# Altium footprint library LM399AHPBF.PcbLib: 1 footprints
Each footprint in its own frame and in the unit in brackets; x right, y up, seen from the top. Pads: shape width x height; smd on the part's side, far side on the other; paste and mask are expansions set on the pad; w line width, h text height; cw(c..) or ccw(c..) is an arc to the next point about the centre after c.
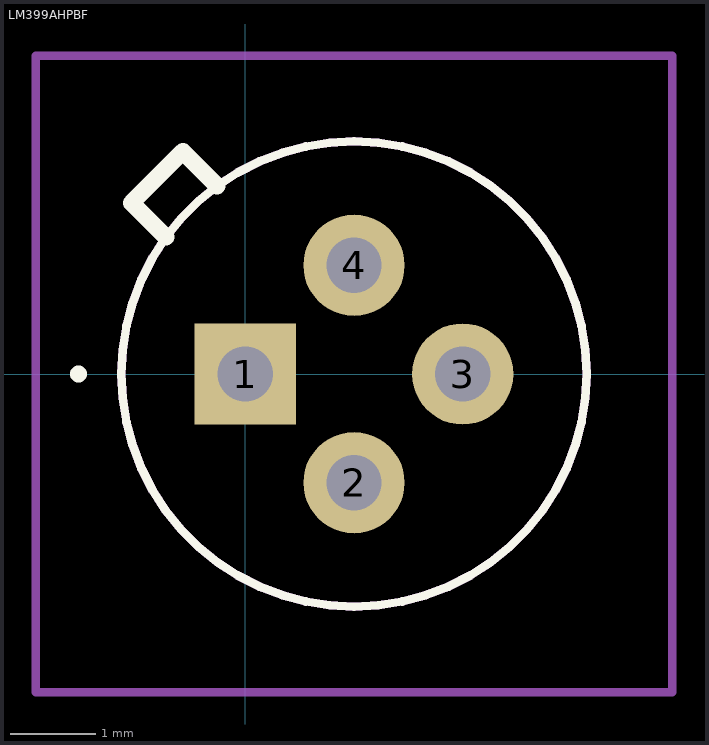
[diagram p0: the footprint, top view; thin cyan lines are the x and y axes]

## LM399AHPBF [mm]
pads (4):
  rect 1.183x1.183 hole 0.645: 1(0,0)
  round 1.183 hole 0.645: 2(1.27,-1.27) 3(2.54,0) 4(1.27,1.27)
Top Overlay:
  lines w0.1: -2,0 cw(c-1.95,0) -1.9,0 ; -2,0 -2,0 ; -2,0 ccw(c-1.95,0) -1.9,0 ; -1.9,0 -1.9,0 ; -1.448,0 -1.448,0 ; -1.448,0 ccw(c1.27,0) 3.988,0 ; -1.448,0 cw(c1.27,0) 3.988,0 ; 3.988,0 3.988,0
  lines w0.2: -0.93,1.6 -1.33,2 -0.73,2.6 -0.33,2.2
Mechanical 15:
  lines w0.1: -0.93,1.6 -1.33,2 -0.73,2.6 -0.33,2.2 ; -1.448,0 -1.448,0 ; -1.448,0 ccw(c1.27,0) 3.988,0 ; -1.448,0 cw(c1.27,0) 3.988,0 ; 3.988,0 3.988,0
Mechanical 20:
  lines w0.1: -2.448,-3.718 4.988,-3.718 4.988,3.718 -2.448,3.718 -2.448,-3.718